# Altium footprint library FootPrintLib_11.PcbLib: 376 footprints (part 17 of 24)
Each footprint in its own frame and in the unit in brackets; x right, y up, seen from the top. Pads: shape width x height; smd on the part's side, far side on the other; paste and mask are expansions set on the pad; w line width, h text height; cw(c..) or ccw(c..) is an arc to the next point about the centre after c.
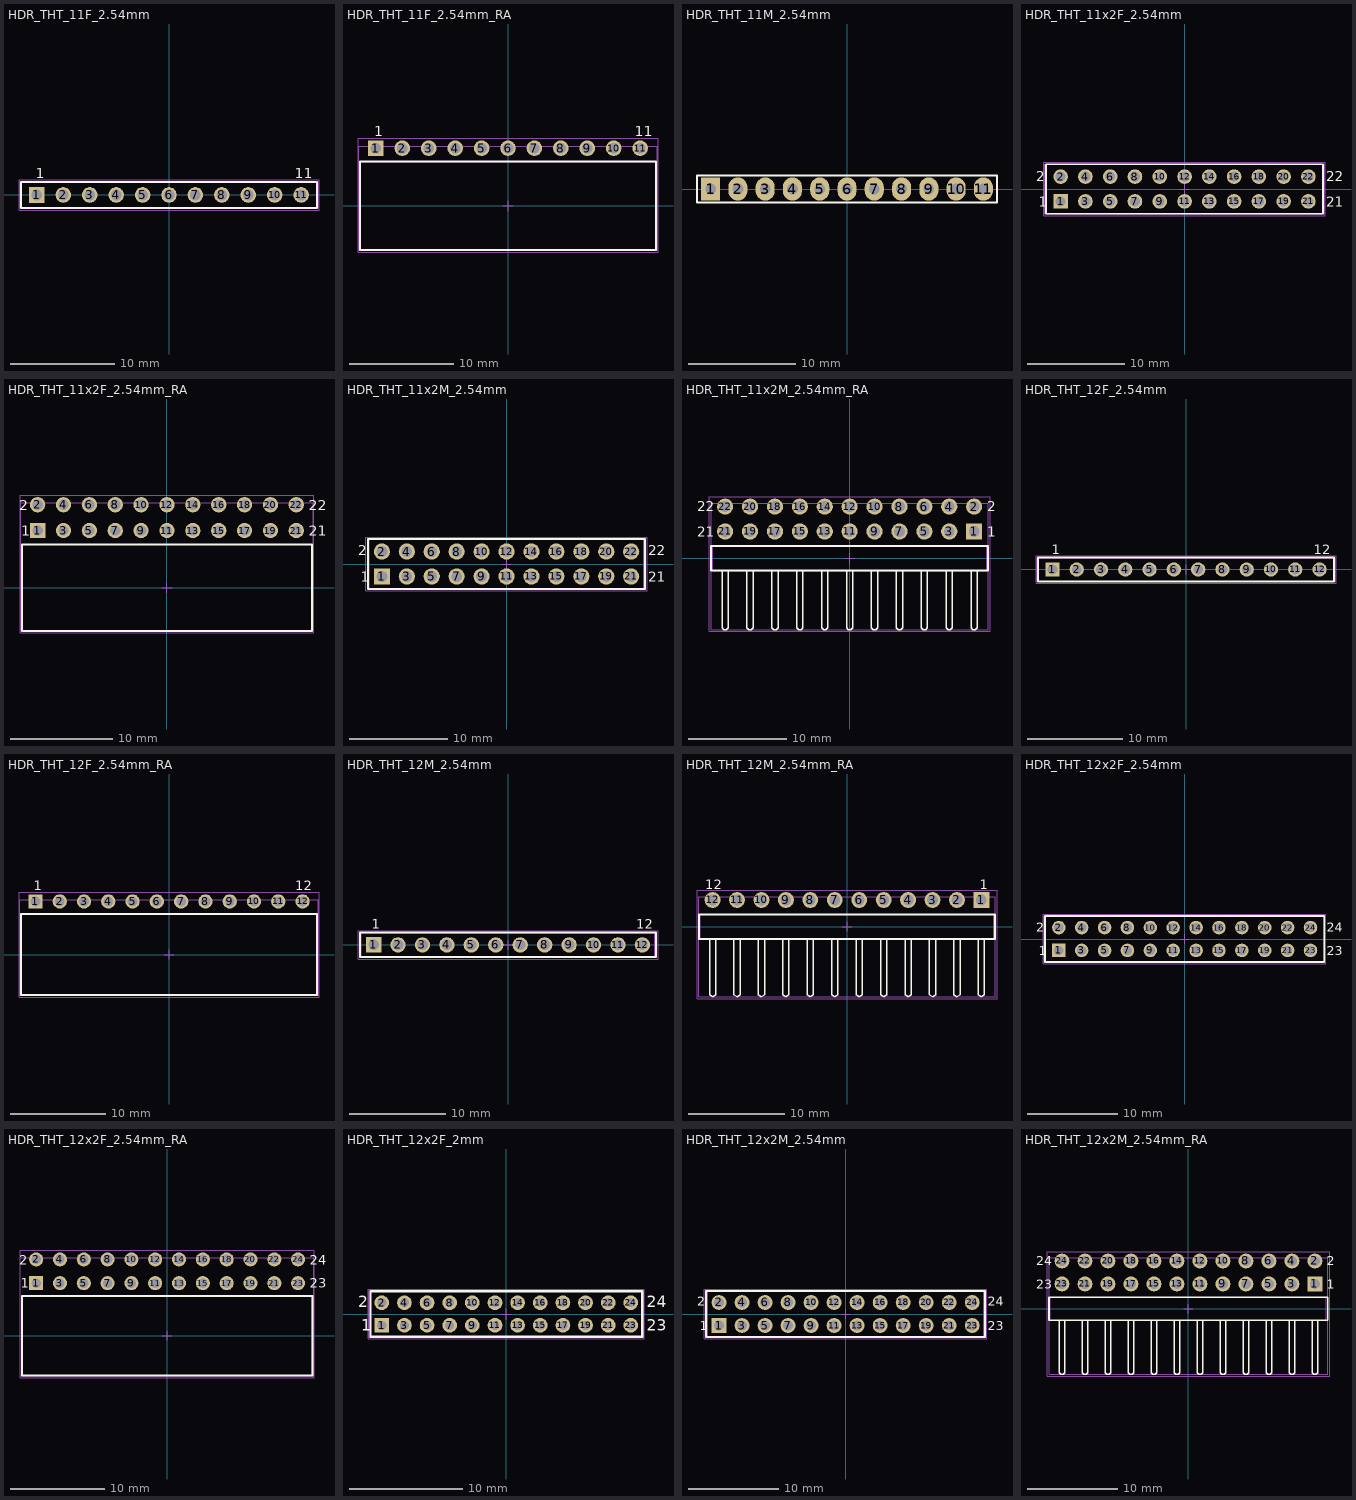
[diagram p16: the footprints below, top view; thin cyan lines are the x and y axes]

## HDR_THT_11F_2.54mm [mm] "Socket Header, Pitch 2.54 mm, THT, Vertical, single row, 11p"
height 8.5
pads (11):
  rect 1.5x1.5 hole 1.02: 1(-12.7,0)
  round 1.5 hole 1.02: 2(-10.16,0) 3(-7.62,0) 4(-5.08,0) 5(-2.54,0) 6(0,0) 7(2.54,0) 8(5.08,0) 9(7.62,0) 10(10.16,0) 11(12.7,0)
Top Overlay:
  lines w0.2: -14.22,-1.25 14.22,-1.25 14.22,1.25 -14.22,1.25 -14.22,-1.25
  text "11" at 12.07,1.6 h1
  text "1" at -12.79,1.6 h1
Mechanical 11:
  lines w0.1: -14.22,-1.25 14.22,-1.25 14.22,1.25 -14.22,1.25 -14.22,-1.25
Mechanical 13:
  lines w0.1: -14.345,-1.25 -14.345,1.25 14.345,1.25 14.345,-1.25 -14.345,-1.25
Mechanical 15:
  lines w0.1: -0.5,0 0.5,0 ; 0,-0.5 0,0.5 ; -14.42,-1.45 -14.42,1.45 14.42,1.45 14.42,-1.45 -14.42,-1.45
3D body "61301111821.stp": height 8.55, standoff -3.06, extent -14.22,-1.25 14.22,1.25

## HDR_THT_11F_2.54mm_RA [mm] "Socket Header, Pitch 2.54 mm, THT, Angled, single row, 11p"
height 2.5
pads (11):
  rect 1.5x1.5 hole 1.02: 1(-12.7,5.55)
  round 1.5 hole 1.02: 2(-10.16,5.55) 3(-7.62,5.55) 4(-5.08,5.55) 5(-2.54,5.55) 6(0,5.55) 7(2.54,5.55) 8(5.08,5.55) 9(7.62,5.55) 10(10.16,5.55) 11(12.7,5.55)
Top Overlay:
  lines w0.2: -14.22,-4.25 14.22,-4.25 14.22,4.25 -14.22,4.25 -14.22,-4.25
  text "11" at 12.2,6.7 h1
  text "1" at -12.86,6.7 h1
Mechanical 11:
  lines w0.1: -14.22,-4.25 -14.22,4.25 14.22,4.25 14.22,-4.25 -14.22,-4.25
Mechanical 13:
  lines w0.1: -14.345,-4.25 14.345,-4.25 14.345,5.75 -14.345,5.75 -14.345,-4.25
Mechanical 15:
  lines w0.1: -0.5,0 0.5,0 ; 0,-0.5 0,0.5 ; -14.42,-4.45 14.42,-4.45 14.42,6.5 -14.42,6.5 -14.42,-4.45
3D body "613011143121.stp": height 2.55, standoff -3.04, extent -14.22,-4.25 14.22,5.75

## HDR_THT_11M_2.54mm [mil] "in Header, pitch 2.54 mm, THT, Vertical, single row, 11p"
pads (11):
  rect 70x85 hole 39.37: 1(-500,0)
  oval 70x85 hole 39.37: 2(-400,0) 3(-300,0) 4(-200,0) 5(-100,0) 6(0,0) 7(100,0) 8(200,0) 9(300,0) 10(400,0) 11(500,0)
Top Overlay:
  lines w7.87: -550,-50 550,-50 550,50 -550,50 -550,-50
3D body "User Library-Single Pin Header.STEP": height 318.31, standoff -106.69, extent -549.99,-49.99 -449.99,50.01
3D body "User Library-Single Pin Header.STEP": height 318.31, standoff -106.69, extent -449.99,-49.99 -349.99,50.01
3D body "User Library-Single Pin Header.STEP": height 318.31, standoff -106.69, extent -349.99,-49.99 -249.99,50.01
3D body "User Library-Single Pin Header.STEP": height 318.31, standoff -106.69, extent -249.99,-49.99 -149.99,50.01
3D body "User Library-Single Pin Header.STEP": height 318.31, standoff -106.69, extent -149.99,-49.99 -49.99,50.01
3D body "User Library-Single Pin Header.STEP": height 318.31, standoff -106.69, extent -49.99,-49.99 50.01,50.01
3D body "User Library-Single Pin Header.STEP": height 318.31, standoff -106.69, extent 450.01,-49.99 550.01,50.01
3D body "User Library-Single Pin Header.STEP": height 318.31, standoff -106.69, extent 350.01,-49.99 450.01,50.01
3D body "User Library-Single Pin Header.STEP": height 318.31, standoff -106.69, extent 250.01,-49.99 350.01,50.01
3D body "User Library-Single Pin Header.STEP": height 318.31, standoff -106.69, extent 150.01,-49.99 250.01,50.01
3D body "User Library-Single Pin Header.STEP": height 318.31, standoff -106.69, extent 50.01,-49.99 150.01,50.01

## HDR_THT_11x2F_2.54mm [mm] "Socket Header, Pitch 2.54 mm, THT, Vertical, dual row, 22p"
height 8.4
pads (22):
  rect 1.5x1.5 hole 1.02: 1(-12.7,-1.27)
  round 1.5 hole 1.02: 2(-12.7,1.27) 3(-10.16,-1.27) 4(-10.16,1.27) 5(-7.62,-1.27) 6(-7.62,1.27) 7(-5.08,-1.27) 8(-5.08,1.27) 9(-2.54,-1.27) 10(-2.54,1.27) 11(0,-1.27) 12(0,1.27) 13(2.54,-1.27) 14(2.54,1.27) 15(5.08,-1.27) 16(5.08,1.27) 17(7.62,-1.27) 18(7.62,1.27) 19(10.16,-1.27) 20(10.16,1.27) 21(12.7,-1.27) 22(12.7,1.27)
Top Overlay:
  lines w0.2: -14.22,-2.54 14.22,-2.54 14.22,2.54 -14.22,2.54 -14.22,-2.54
  text "22" at 14.53,0.8 h1
  text "21" at 14.53,-1.8 h1
  text "1" at -14.93,-1.8 h1
  text "2" at -15.23,0.8 h1
Mechanical 11:
  lines w0.1: -14.22,-2.54 -14.22,2.54 14.22,2.54 14.22,-2.54 -14.22,-2.54
Mechanical 13:
  lines w0.1: -14.345,-2.54 14.345,-2.54 14.345,2.54 -14.345,2.54 -14.345,-2.54
Mechanical 15:
  lines w0.1: -0.5,0 0.5,0 ; 0,-0.5 0,0.5 ; -14.42,-2.74 14.42,-2.74 14.42,2.74 -14.42,2.74 -14.42,-2.74
3D body "61302221821.stp": height 8.45, standoff -3.05, extent -14.22,-2.54 14.22,2.54

## HDR_THT_11x2F_2.54mm_RA [mm] "Socket Header, Pitch 2.54 mm, THT, Angled, dual row, 22p"
height 5.08
pads (22):
  rect 1.5x1.5 hole 1.02: 1(-12.7,5.61)
  round 1.5 hole 1.02: 2(-12.7,8.15) 3(-10.16,5.61) 4(-10.16,8.15) 5(-7.62,5.61) 6(-7.62,8.15) 7(-5.08,5.61) 8(-5.08,8.15) 9(-2.54,5.61) 10(-2.54,8.15) 11(0,5.61) 12(0,8.15) 13(2.54,5.61) 14(2.54,8.15) 15(5.08,5.61) 16(5.08,8.15) 17(7.62,5.61) 18(7.62,8.15) 19(10.16,5.61) 20(10.16,8.15) 21(12.7,5.61) 22(12.7,8.15)
Top Overlay:
  lines w0.2: -14.22,-4.25 -14.22,4.25 14.22,4.25 14.22,-4.25 -14.22,-4.25
  text "2" at -14.53,7.6 h1
  text "1" at -14.33,5.1 h1
  text "21" at 13.93,5.1 h1
  text "22" at 13.93,7.6 h1
Mechanical 11:
  lines w0.1: -14.22,-4.25 14.22,-4.25 14.22,4.25 -14.22,4.25 -14.22,-4.25
Mechanical 13:
  lines w0.1: -14.37,-4.25 14.37,-4.25 14.37,8.35 -14.37,8.35 -14.37,-4.25
Mechanical 15:
  lines w0.1: -0.5,0 0.5,0 ; 0,-0.5 0,0.5 ; -14.42,-4.45 14.42,-4.45 14.42,9.1 -14.42,9.1 -14.42,-4.45
3D body "613022243121.stp": height 5.05, standoff -3.25, extent -14.22,-4.25 14.22,8.35

## HDR_THT_11x2M_2.54mm [mm] "Pin Header, pitch 2.54 mm, THT, Vertical, dual row, 22p"
height 8.54
pads (22):
  rect 1.65x1.65 hole 1.1: 1(-12.7,-1.27)
  round 1.65 hole 1.1: 2(-12.7,1.27) 3(-10.16,-1.27) 4(-10.16,1.27) 5(-7.62,-1.27) 6(-7.62,1.27) 7(-5.08,-1.27) 8(-5.08,1.27) 9(-2.54,-1.27) 10(-2.54,1.27) 11(0,-1.27) 12(0,1.27) 13(2.54,-1.27) 14(2.54,1.27) 15(5.08,-1.27) 16(5.08,1.27) 17(7.62,-1.27) 18(7.62,1.27) 19(10.16,-1.27) 20(10.16,1.27) 21(12.7,-1.27) 22(12.7,1.27)
Top Overlay:
  lines w0.2: -14.12,-2.54 14.12,-2.54 14.12,2.54 -14.12,2.54 -14.12,-2.54
  text "1" at -14.83,-1.8 h1
  text "2" at -15.13,0.9 h1
  text "21" at 14.43,-1.8 h1
  text "22" at 14.43,0.9 h1
Mechanical 11:
  lines w0.1: -13.97,-2.54 13.97,-2.54 13.97,2.54 -13.97,2.54 -13.97,-2.54
Mechanical 13:
  lines w0.1: -14.12,-2.54 14.12,-2.54 14.12,2.54 -14.12,2.54 -14.12,-2.54
Mechanical 15:
  lines w0.1: -0.5,0 0.5,0 ; 0,-0.5 0,0.5 ; -14.32,-2.74 14.32,-2.74 14.32,2.74 -14.32,2.74 -14.32,-2.74
3D body "61302221121.stp": height 8.59, standoff -2.95, extent -13.97,-2.54 13.97,2.54

## HDR_THT_11x2M_2.54mm_RA [mm] "Pin Header, pitch 2.54 mm, THT, Angled, dual row, 22p"
height 5.08
pads (22):
  rect 1.65x1.65 hole 1.1: 1(12.7,2.73)
  round 1.65 hole 1.1: 2(12.7,5.27) 3(10.16,2.73) 4(10.16,5.27) 5(7.62,2.73) 6(7.62,5.27) 7(5.08,2.73) 8(5.08,5.27) 9(2.54,2.73) 10(2.54,5.27) 11(0,2.73) 12(0,5.27) 13(-2.54,2.73) 14(-2.54,5.27) 15(-5.08,2.73) 16(-5.08,5.27) 17(-7.62,2.73) 18(-7.62,5.27) 19(-10.16,2.73) 20(-10.16,5.27) 21(-12.7,2.73) 22(-12.7,5.27)
Top Overlay:
  lines w0.15: -13.02,-1.335 -13.02,-7.07 -12.82,-7.27 -12.58,-7.27 -12.38,-7.07 -12.38,-1.31 ; -10.48,-1.335 -10.48,-7.07 -10.28,-7.27 -10.04,-7.27 -9.84,-7.07 -9.84,-1.31 ; -7.94,-1.335 -7.94,-7.07 -7.74,-7.27 -7.5,-7.27 -7.3,-7.07 -7.3,-1.31 ; -5.4,-1.335 -5.4,-7.07 -5.2,-7.27 -4.96,-7.27 -4.76,-7.07 -4.76,-1.31 ; -2.86,-1.335 -2.86,-7.07 -2.66,-7.27 -2.42,-7.27 -2.22,-7.07 -2.22,-1.31 ; -0.32,-1.335 -0.32,-7.07 -0.12,-7.27 0.12,-7.27 0.32,-7.07 0.32,-1.31 ; 2.22,-1.335 2.22,-7.07 2.42,-7.27 2.66,-7.27 2.86,-7.07 2.86,-1.31 ; 4.76,-1.335 4.76,-7.07 4.96,-7.27 5.2,-7.27 5.4,-7.07 5.4,-1.31 ; 7.3,-1.335 7.3,-7.07 7.5,-7.27 7.74,-7.27 7.94,-7.07 7.94,-1.31 ; 9.84,-1.335 9.84,-7.07 10.04,-7.27 10.28,-7.27 10.48,-7.07 10.48,-1.31 ; 12.38,-1.335 12.38,-7.07 12.58,-7.27 12.82,-7.27 13.02,-7.07 13.02,-1.31
  lines w0.2: -14.12,-1.27 14.12,-1.27 14.12,1.27 -14.12,1.27 -14.12,-1.27
  text "2" at 14.03,4.8 h1
  text "1" at 14.03,2.2 h1
  text "21" at -15.57,2.2 h1
  text "22" at -15.57,4.8 h1
Mechanical 11:
  lines w0.1: -13.97,-1.27 13.97,-1.27 13.97,1.27 -13.97,1.27 -13.97,-1.27
Mechanical 13:
  lines w0.1: -14.12,-7.27 -14.12,5.63 14.12,5.63 14.12,-7.27 -14.12,-7.27
Mechanical 15:
  lines w0.1: -0.5,0 0.5,0 ; 0,-0.5 0,0.5 ; -14.32,-7.47 -14.32,6.295 14.32,6.295 14.32,-7.47 -14.32,-7.47
3D body "61302221021.stp": height 5.14, standoff -2.94, extent -13.97,-7.27 13.97,5.63

## HDR_THT_12F_2.54mm [mm] "Socket Header, Pitch 2.54 mm, THT, Vertical, single row, 12p"
height 8.5
pads (12):
  rect 1.5x1.5 hole 1.02: 1(-13.97,0)
  round 1.5 hole 1.02: 2(-11.43,0) 3(-8.89,0) 4(-6.35,0) 5(-3.81,0) 6(-1.27,0) 7(1.27,0) 8(3.81,0) 9(6.35,0) 10(8.89,0) 11(11.43,0) 12(13.97,0)
Top Overlay:
  lines w0.2: -15.49,-1.25 -15.49,1.25 15.49,1.25 15.49,-1.25 -15.49,-1.25
  text "1" at -14.06,1.6 h1
  text "12" at 13.34,1.6 h1
Mechanical 11:
  lines w0.1: -15.49,-1.25 -15.49,1.25 15.49,1.25 15.49,-1.25 -15.49,-1.25
Mechanical 13:
  lines w0.1: -15.615,-1.25 15.615,-1.25 15.615,1.25 -15.615,1.25 -15.615,-1.25
Mechanical 15:
  lines w0.1: -0.5,0 0.5,0 ; 0,-0.5 0,0.5 ; -15.69,-1.45 15.69,-1.45 15.69,1.45 -15.69,1.45 -15.69,-1.45
3D body "61301211821.stp": height 8.55, standoff -3.06, extent -15.49,-1.25 15.49,1.25

## HDR_THT_12F_2.54mm_RA [mm] "Socket Header, Pitch 2.54 mm, THT, Angled, single row, 12p"
height 2.5
pads (12):
  rect 1.5x1.5 hole 1.02: 1(-13.97,5.55)
  round 1.5 hole 1.02: 2(-11.43,5.55) 3(-8.89,5.55) 4(-6.35,5.55) 5(-3.81,5.55) 6(-1.27,5.55) 7(1.27,5.55) 8(3.81,5.55) 9(6.35,5.55) 10(8.89,5.55) 11(11.43,5.55) 12(13.97,5.55)
Top Overlay:
  lines w0.2: -15.49,-4.25 -15.49,4.25 15.49,4.25 15.49,-4.25 -15.49,-4.25
  text "1" at -14.13,6.7 h1
  text "12" at 13.23,6.7 h1
Mechanical 11:
  lines w0.1: -15.49,-4.25 15.49,-4.25 15.49,4.25 -15.49,4.25 -15.49,-4.25
Mechanical 13:
  lines w0.1: -15.615,-4.25 -15.615,5.75 15.615,5.75 15.615,-4.25 -15.615,-4.25
Mechanical 15:
  lines w0.1: -0.5,0 0.5,0 ; 0,-0.5 0,0.5 ; -15.69,-4.45 -15.69,6.5 15.69,6.5 15.69,-4.45 -15.69,-4.45
3D body "613012143121.stp": height 2.55, standoff -3.04, extent -15.49,-4.25 15.49,5.75

## HDR_THT_12M_2.54mm [mm] "Pin Header, pitch 2.54 mm, THT, Vertical, single row, 12p"
height 8.54
pads (12):
  rect 1.6x1.6 hole 1.1: 1(-13.97,0)
  round 1.6 hole 1.1: 2(-11.43,0) 3(-8.89,0) 4(-6.35,0) 5(-3.81,0) 6(-1.27,0) 7(1.27,0) 8(3.81,0) 9(6.35,0) 10(8.89,0) 11(11.43,0) 12(13.97,0)
Top Overlay:
  lines w0.2: -15.39,-1.27 15.39,-1.27 15.39,1.27 -15.39,1.27 -15.39,-1.27
  text "1" at -14.16,1.7 h1
  text "12" at 13.34,1.7 h1
Mechanical 11:
  lines w0.1: -15.24,-1.27 -15.24,1.27 15.24,1.27 15.24,-1.27 -15.24,-1.27
Mechanical 13:
  lines w0.1: -15.39,-1.27 15.39,-1.27 15.39,1.27 -15.39,1.27 -15.39,-1.27
Mechanical 15:
  lines w0.1: -0.5,0 0.5,0 ; 0,-0.5 0,0.5 ; -15.59,-1.47 15.59,-1.47 15.59,1.47 -15.59,1.47 -15.59,-1.47
3D body "61301211121.stp": height 8.57, standoff -2.97, extent -15.24,-1.27 15.24,1.27

## HDR_THT_12M_2.54mm_RA [mm] "Pin Header, pitch 2.54 mm, THT, Angled, single row, 12p"
height 2.54
pads (12):
  rect 1.65x1.65 hole 1.1: 1(13.97,2.77)
  round 1.65 hole 1.1: 2(11.43,2.77) 3(8.89,2.77) 4(6.35,2.77) 5(3.81,2.77) 6(1.27,2.77) 7(-1.27,2.77) 8(-3.81,2.77) 9(-6.35,2.77) 10(-8.89,2.77) 11(-11.43,2.77) 12(-13.97,2.77)
Top Overlay:
  lines w0.15: -14.29,-1.27 -14.29,-7.07 -13.97,-7.27 -13.65,-7.07 -13.65,-1.27 ; -11.75,-1.27 -11.75,-7.07 -11.43,-7.27 -11.11,-7.07 -11.11,-1.27 ; -9.21,-1.27 -9.21,-7.07 -8.89,-7.27 -8.57,-7.07 -8.57,-1.27 ; -6.67,-1.27 -6.67,-7.07 -6.35,-7.27 -6.03,-7.07 -6.03,-1.27 ; -4.13,-1.27 -4.13,-7.07 -3.81,-7.27 -3.49,-7.07 -3.49,-1.27 ; -1.59,-1.27 -1.59,-7.07 -1.27,-7.27 -0.95,-7.07 -0.95,-1.27 ; 0.95,-1.27 0.95,-7.07 1.27,-7.27 1.59,-7.07 1.59,-1.27 ; 3.49,-1.27 3.49,-7.07 3.81,-7.27 4.13,-7.07 4.13,-1.27 ; 6.03,-1.27 6.03,-7.07 6.35,-7.27 6.67,-7.07 6.67,-1.27 ; 8.57,-1.27 8.57,-7.07 8.89,-7.27 9.21,-7.07 9.21,-1.27 ; 11.11,-1.27 11.11,-7.07 11.43,-7.27 11.75,-7.07 11.75,-1.27 ; 13.65,-1.27 13.65,-7.07 13.97,-7.27 14.29,-7.07 14.29,-1.27
  lines w0.2: -15.39,-1.27 -15.39,1.27 15.39,1.27 15.39,-1.27 -15.39,-1.27
  text "12" at -14.74,3.9 h1
  text "1" at 13.8,3.9 h1
Mechanical 11:
  lines w0.1: -15.24,-1.27 -15.24,1.27 15.24,1.27 15.24,-1.27 -15.24,-1.27
Mechanical 13:
  lines w0.1: -15.39,-7.27 -15.39,3.09 15.39,3.09 15.39,-7.27 -15.39,-7.27
Mechanical 15:
  lines w0.1: -0.5,0 0.5,0 ; 0,-0.5 0,0.5 ; -15.59,-7.47 15.59,-7.47 15.59,3.795 -15.59,3.795 -15.59,-7.47
3D body "61301211021.stp": height 2.62, standoff -2.92, extent -15.24,-7.27 15.24,3.09

## HDR_THT_12x2F_2.54mm [mm] "Socket Header, Pitch 2.54 mm, THT, Vertical, dual row, 24p"
height 8.4
pads (24):
  rect 1.5x1.5 hole 1.02: 1(-13.97,-1.27)
  round 1.5 hole 1.02: 2(-13.97,1.27) 3(-11.43,-1.27) 4(-11.43,1.27) 5(-8.89,-1.27) 6(-8.89,1.27) 7(-6.35,-1.27) 8(-6.35,1.27) 9(-3.81,-1.27) 10(-3.81,1.27) 11(-1.27,-1.27) 12(-1.27,1.27) 13(1.27,-1.27) 14(1.27,1.27) 15(3.81,-1.27) 16(3.81,1.27) 17(6.35,-1.27) 18(6.35,1.27) 19(8.89,-1.27) 20(8.89,1.27) 21(11.43,-1.27) 22(11.43,1.27) 23(13.97,-1.27) 24(13.97,1.27)
Top Overlay:
  lines w0.2: -15.49,-2.54 -15.49,2.54 15.49,2.54 15.49,-2.54 -15.49,-2.54
  text "2" at -16.5,0.8 h1
  text "1" at -16.2,-1.8 h1
  text "23" at 15.8,-1.8 h1
  text "24" at 15.8,0.8 h1
Mechanical 11:
  lines w0.1: -15.49,-2.54 15.49,-2.54 15.49,2.54 -15.49,2.54 -15.49,-2.54
Mechanical 13:
  lines w0.1: -15.615,-2.54 -15.615,2.54 15.615,2.54 15.615,-2.54 -15.615,-2.54
Mechanical 15:
  lines w0.1: -0.5,0 0.5,0 ; 0,-0.5 0,0.5 ; -15.69,-2.74 -15.69,2.74 15.69,2.74 15.69,-2.74 -15.69,-2.74
3D body "61302421821.stp": height 8.45, standoff -3.05, extent -15.49,-2.54 15.49,2.54

## HDR_THT_12x2F_2.54mm_RA [mm] "Socket Header, Pitch 2.54 mm, THT, Angled, dual row, 24p"
height 5.08
pads (24):
  rect 1.5x1.5 hole 1.02: 1(-13.97,5.61)
  round 1.5 hole 1.02: 2(-13.97,8.15) 3(-11.43,5.61) 4(-11.43,8.15) 5(-8.89,5.61) 6(-8.89,8.15) 7(-6.35,5.61) 8(-6.35,8.15) 9(-3.81,5.61) 10(-3.81,8.15) 11(-1.27,5.61) 12(-1.27,8.15) 13(1.27,5.61) 14(1.27,8.15) 15(3.81,5.61) 16(3.81,8.15) 17(6.35,5.61) 18(6.35,8.15) 19(8.89,5.61) 20(8.89,8.15) 21(11.43,5.61) 22(11.43,8.15) 23(13.97,5.61) 24(13.97,8.15)
Top Overlay:
  lines w0.2: -15.49,-4.25 15.49,-4.25 15.49,4.25 -15.49,4.25 -15.49,-4.25
  text "24" at 15.2,7.6 h1
  text "23" at 15.2,5.1 h1
  text "1" at -15.6,5.1 h1
  text "2" at -15.8,7.6 h1
Mechanical 11:
  lines w0.1: -15.49,-4.25 -15.49,4.25 15.49,4.25 15.49,-4.25 -15.49,-4.25
Mechanical 13:
  lines w0.1: -15.64,-4.25 -15.64,8.35 15.64,8.35 15.64,-4.25 -15.64,-4.25
Mechanical 15:
  lines w0.1: -0.5,0 0.5,0 ; 0,-0.5 0,0.5 ; -15.69,-4.45 -15.69,9.1 15.69,9.1 15.69,-4.45 -15.69,-4.45
3D body "613024243121.stp": height 5.05, standoff -3.25, extent -15.49,-4.25 15.49,8.35

## HDR_THT_12x2F_2mm [mm] "Socket Header, Pitch 2.00 mm, THT, Vertical, dual row, 24p"
height 4.45
pads (24):
  rect 1.3x1.3 hole 0.8: 1(-11,-1)
  round 1.3 hole 0.8: 2(-11,1) 3(-9,-1) 4(-9,1) 5(-7,-1) 6(-7,1) 7(-5,-1) 8(-5,1) 9(-3,-1) 10(-3,1) 11(-1,-1) 12(-1,1) 13(1,-1) 14(1,1) 15(3,-1) 16(3,1) 17(5,-1) 18(5,1) 19(7,-1) 20(7,1) 21(9,-1) 22(9,1) 23(11,-1) 24(11,1)
Top Overlay:
  lines w0.2: -12,-2 -12,2 12,2 12,-2 -12,-2
  text "23" at 12.4,-1.5 h1
  text "24" at 12.4,0.6 h1
  text "1" at -12.8,-1.5 h1
  text "2" at -13.1,0.6 h1
Mechanical 11:
  lines w0.1: -12,-2 -12,2 12,2 12,-2 -12,-2
Mechanical 13:
  lines w0.1: -12.15,-2.075 -12.15,2.075 12.15,2.075 12.15,-2.075 -12.15,-2.075
Mechanical 15:
  lines w0.1: -0.5,0 0.5,0 ; 0,-0.5 0,0.5 ; -12.2,-2.2 -12.2,2.2 12.2,2.2 12.2,-2.2 -12.2,-2.2
3D body "62002421821.stp": height 4.35, standoff -2.35, extent -12.25,-2 12.25,2

## HDR_THT_12x2M_2.54mm [mm] "Pin Header, pitch 2.54 mm, THT, Vertical, dual row, 24p"
height 8.54
pads (24):
  rect 1.65x1.65 hole 1.1: 1(-13.97,-1.27)
  round 1.65 hole 1.1: 2(-13.97,1.27) 3(-11.43,-1.27) 4(-11.43,1.27) 5(-8.89,-1.27) 6(-8.89,1.27) 7(-6.35,-1.27) 8(-6.35,1.27) 9(-3.81,-1.27) 10(-3.81,1.27) 11(-1.27,-1.27) 12(-1.27,1.27) 13(1.27,-1.27) 14(1.27,1.27) 15(3.81,-1.27) 16(3.81,1.27) 17(6.35,-1.27) 18(6.35,1.27) 19(8.89,-1.27) 20(8.89,1.27) 21(11.43,-1.27) 22(11.43,1.27) 23(13.97,-1.27) 24(13.97,1.27)
Top Overlay:
  lines w0.2: -15.39,-2.54 15.39,-2.54 15.39,2.54 -15.39,2.54 -15.39,-2.54
  text "24" at 15.7,0.9 h1
  text "23" at 15.7,-1.8 h1
  text "1" at -16.1,-1.8 h1
  text "2" at -16.4,0.9 h1
Mechanical 11:
  lines w0.1: -15.24,-2.54 15.24,-2.54 15.24,2.54 -15.24,2.54 -15.24,-2.54
Mechanical 13:
  lines w0.1: -15.39,-2.54 15.39,-2.54 15.39,2.54 -15.39,2.54 -15.39,-2.54
Mechanical 15:
  lines w0.1: -0.5,0 0.5,0 ; 0,-0.5 0,0.5 ; -15.59,-2.74 15.59,-2.74 15.59,2.74 -15.59,2.74 -15.59,-2.74
3D body "61302421121.stp": height 8.59, standoff -2.95, extent -15.24,-2.54 15.24,2.54

## HDR_THT_12x2M_2.54mm_RA [mm] "Pin Header, pitch 2.54 mm, THT, Angled, dual row, 24p"
height 5.08
pads (24):
  rect 1.65x1.65 hole 1.1: 1(13.97,2.73)
  round 1.65 hole 1.1: 2(13.97,5.27) 3(11.43,2.73) 4(11.43,5.27) 5(8.89,2.73) 6(8.89,5.27) 7(6.35,2.73) 8(6.35,5.27) 9(3.81,2.73) 10(3.81,5.27) 11(1.27,2.73) 12(1.27,5.27) 13(-1.27,2.73) 14(-1.27,5.27) 15(-3.81,2.73) 16(-3.81,5.27) 17(-6.35,2.73) 18(-6.35,5.27) 19(-8.89,2.73) 20(-8.89,5.27) 21(-11.43,2.73) 22(-11.43,5.27) 23(-13.97,2.73) 24(-13.97,5.27)
Top Overlay:
  lines w0.15: -14.29,-1.335 -14.29,-7.07 -14.09,-7.27 -13.85,-7.27 -13.65,-7.07 -13.65,-1.31 ; -11.75,-1.335 -11.75,-7.07 -11.55,-7.27 -11.31,-7.27 -11.11,-7.07 -11.11,-1.31 ; -9.21,-1.335 -9.21,-7.07 -9.01,-7.27 -8.77,-7.27 -8.57,-7.07 -8.57,-1.31 ; -6.67,-1.335 -6.67,-7.07 -6.47,-7.27 -6.23,-7.27 -6.03,-7.07 -6.03,-1.31 ; -4.13,-1.335 -4.13,-7.07 -3.93,-7.27 -3.69,-7.27 -3.49,-7.07 -3.49,-1.31 ; -1.59,-1.335 -1.59,-7.07 -1.39,-7.27 -1.15,-7.27 -0.95,-7.07 -0.95,-1.31 ; 0.95,-1.335 0.95,-7.07 1.15,-7.27 1.39,-7.27 1.59,-7.07 1.59,-1.31 ; 3.49,-1.335 3.49,-7.07 3.69,-7.27 3.93,-7.27 4.13,-7.07 4.13,-1.31 ; 6.03,-1.335 6.03,-7.07 6.23,-7.27 6.47,-7.27 6.67,-7.07 6.67,-1.31 ; 8.57,-1.335 8.57,-7.07 8.77,-7.27 9.01,-7.27 9.21,-7.07 9.21,-1.31 ; 11.11,-1.335 11.11,-7.07 11.31,-7.27 11.55,-7.27 11.75,-7.07 11.75,-1.31 ; 13.65,-1.335 13.65,-7.07 13.85,-7.27 14.09,-7.27 14.29,-7.07 14.29,-1.31
  lines w0.2: -15.39,-1.27 15.39,-1.27 15.39,1.27 -15.39,1.27 -15.39,-1.27
  text "2" at 15.3,4.8 h1
  text "1" at 15.3,2.2 h1
  text "23" at -16.84,2.2 h1
  text "24" at -16.84,4.8 h1
Mechanical 11:
  lines w0.1: -15.24,-1.27 15.24,-1.27 15.24,1.27 -15.24,1.27 -15.24,-1.27
Mechanical 13:
  lines w0.1: -15.39,-7.27 -15.39,5.63 15.39,5.63 15.39,-7.27 -15.39,-7.27
Mechanical 15:
  lines w0.1: -0.5,0 0.5,0 ; 0,-0.5 0,0.5 ; -15.59,-7.47 -15.59,6.295 15.59,6.295 15.59,-7.47 -15.59,-7.47
3D body "61302421021.stp": height 5.14, standoff -2.94, extent -15.24,-7.27 15.24,5.63